# Altium footprint library FootPrintLib_1.PcbLib: 498 footprints (part 23 of 35)
Each footprint in its own frame and in the unit in brackets; x right, y up, seen from the top. Pads: shape width x height; smd on the part's side, far side on the other; paste and mask are expansions set on the pad; w line width, h text height; cw(c..) or ccw(c..) is an arc to the next point about the centre after c.
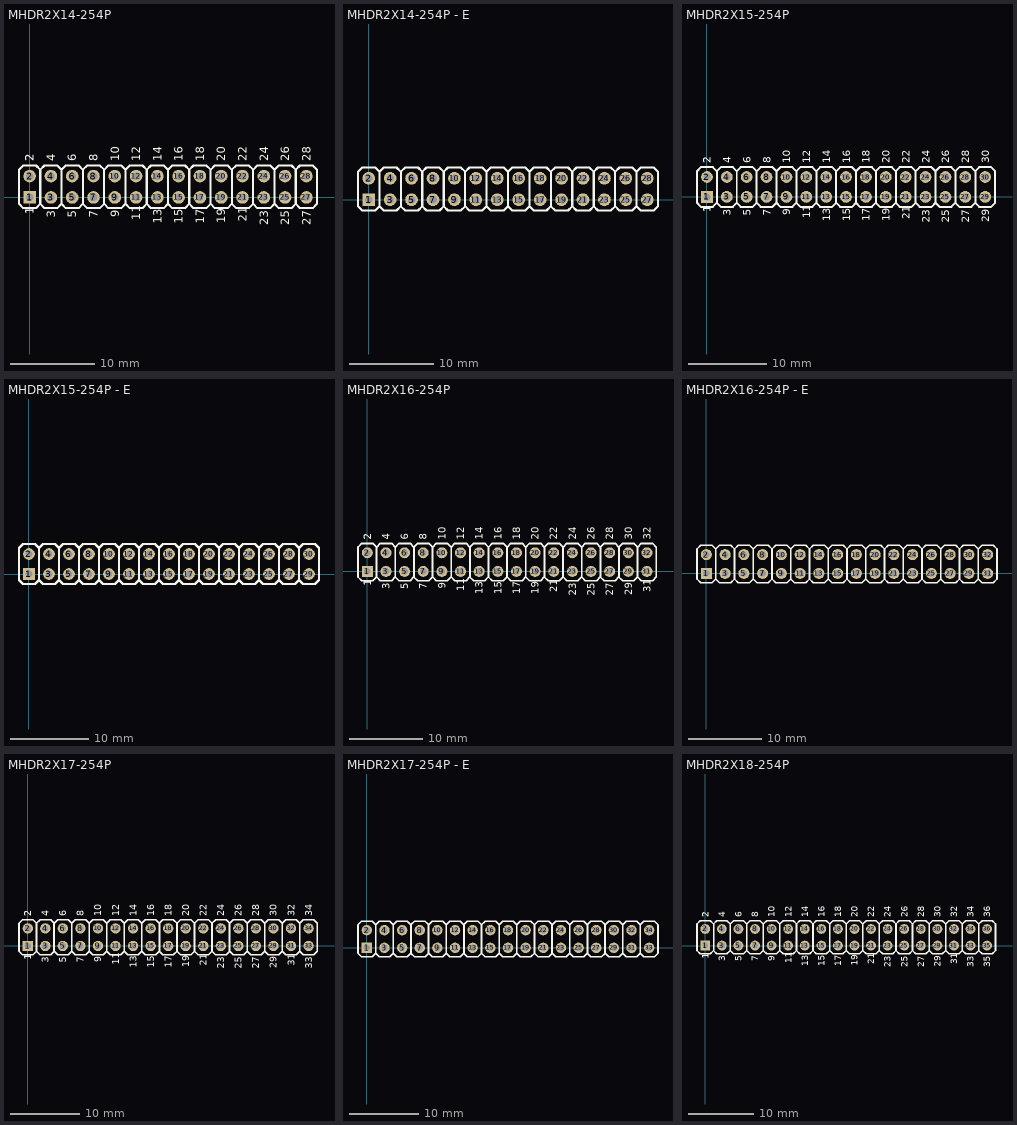
[diagram p22: the footprints below, top view; thin cyan lines are the x and y axes]

## MHDR2X14-254P [mm] "Male Header 2X14 with 2.54 mm Pitch"
pads (28):
  rect 1.5x1.5 hole 0.9: 1(0,0)
  round 1.5 hole 0.9: 2(0,2.54) 3(2.54,0) 4(2.54,2.54) 5(5.08,0) 6(5.08,2.54) 7(7.62,0) 8(7.62,2.54) 9(10.16,0) 10(10.16,2.54) 11(12.7,0) 12(12.7,2.54) 13(15.24,0) 14(15.24,2.54) 15(17.78,0) 16(17.78,2.54) 17(20.32,0) 18(20.32,2.54) 19(22.86,0) 20(22.86,2.54) 21(25.4,0) 22(25.4,2.54) 23(27.94,0) 24(27.94,2.54) 25(30.48,0) 26(30.48,2.54) 27(33.02,0) 28(33.02,2.54)
Top Overlay:
  lines w0.254: 1.27,-0.762 1.777,-1.268 3.302,-1.268 3.81,-0.76 3.81,3.304 4.318,3.812 5.841,3.812 6.35,3.302 ; 1.27,3.302 0.761,3.812 -0.762,3.812 -1.27,3.304 -1.27,-0.762 -0.763,-1.268 0.762,-1.268 1.27,-0.76 1.27,3.304 1.778,3.812 3.301,3.812 3.81,3.302 ; 3.81,-0.762 4.317,-1.268 5.842,-1.268 6.35,-0.76 6.35,3.304 6.858,3.812 8.381,3.812 8.89,3.302 ; 6.35,-0.762 6.857,-1.268 8.382,-1.268 8.89,-0.76 8.89,3.304 9.398,3.812 10.921,3.812 11.43,3.302 ; 8.89,-0.762 9.397,-1.268 10.922,-1.268 11.43,-0.76 11.43,3.304 11.938,3.812 13.461,3.812 13.97,3.302 ; 11.43,-0.762 11.937,-1.268 13.462,-1.268 13.97,-0.76 13.97,3.304 14.478,3.812 16.001,3.812 16.51,3.302 ; 13.97,-0.762 14.477,-1.268 16.002,-1.268 16.51,-0.76 16.51,3.304 17.018,3.812 18.541,3.812 19.05,3.302 ; 16.51,-0.762 17.017,-1.268 18.542,-1.268 19.05,-0.76 19.05,3.304 19.558,3.812 21.081,3.812 21.59,3.302 ; 19.05,-0.762 19.557,-1.268 21.082,-1.268 21.59,-0.76 21.59,3.304 22.098,3.812 23.621,3.812 24.13,3.302 ; 21.59,-0.762 22.097,-1.268 23.622,-1.268 24.13,-0.76 24.13,3.304 24.638,3.812 26.161,3.812 26.67,3.302 ; 24.13,-0.762 24.637,-1.268 26.162,-1.268 26.67,-0.76 26.67,3.304 27.178,3.812 28.701,3.812 29.21,3.302 ; 26.67,-0.762 27.177,-1.268 28.702,-1.268 29.21,-0.76 29.21,3.304 29.718,3.812 31.241,3.812 31.75,3.302 ; 29.21,-0.762 29.717,-1.268 31.242,-1.268 31.75,-0.76 31.75,3.304 32.258,3.812 33.781,3.812 34.29,3.302 ; 31.75,-0.762 32.257,-1.268 33.782,-1.268 34.29,-0.76 34.29,3.304
  text "1" at 0.508,-1.983 h1
  text "2" at 0.508,4.318 h1
  text "2" at 0.508,4.318 h1
  text "1" at 0.508,-1.983 h1
  text "4" at 3.048,4.318 h1
  text "3" at 3.048,-2.412 h1
  text "6" at 5.588,4.318 h1
  text "5" at 5.588,-2.412 h1
  text "8" at 8.128,4.318 h1
  text "7" at 8.128,-2.412 h1
  text "10" at 10.668,4.318 h1
  text "9" at 10.668,-2.364 h1
  text "12" at 13.208,4.318 h1
  text "11" at 13.208,-2.716 h1
  text "14" at 15.748,4.318 h1
  text "13" at 15.748,-3.145 h1
  text "16" at 18.288,4.318 h1
  text "15" at 18.288,-3.145 h1
  text "18" at 20.828,4.318 h1
  text "17" at 20.828,-3.145 h1
  text "20" at 23.368,4.318 h1
  text "19" at 23.368,-3.097 h1
  text "22" at 25.908,4.318 h1
  text "21" at 25.908,-2.874 h1
  text "24" at 28.448,4.318 h1
  text "23" at 28.448,-3.302 h1
  text "26" at 30.988,4.318 h1
  text "25" at 30.988,-3.302 h1
  text "28" at 33.528,4.318 h1
  text "27" at 33.528,-3.302 h1
3D body "PIN.STEP": height 8.43, standoff -2.49, extent 31.75,-1.27 34.29,1.27
3D body "PIN.STEP": height 8.43, standoff -2.49, extent 31.75,1.27 34.29,3.81
3D body "PIN.STEP": height 8.43, standoff -2.49, extent -1.27,1.27 1.27,3.81
3D body "PIN_mid.STEP": height 8.43, standoff -2.49, extent 29.21,-1.27 31.75,1.27
3D body "PIN_mid.STEP": height 8.43, standoff -2.49, extent 26.67,-1.27 29.21,1.27
3D body "PIN_mid.STEP": height 8.43, standoff -2.49, extent 24.13,-1.27 26.67,1.27
3D body "PIN_mid.STEP": height 8.43, standoff -2.49, extent 21.59,-1.27 24.13,1.27
3D body "PIN_mid.STEP": height 8.43, standoff -2.49, extent 19.05,-1.27 21.59,1.27
3D body "PIN_mid.STEP": height 8.43, standoff -2.49, extent 16.51,-1.27 19.05,1.27
3D body "PIN_mid.STEP": height 8.43, standoff -2.49, extent 13.97,-1.27 16.51,1.27
3D body "PIN_mid.STEP": height 8.43, standoff -2.49, extent 11.43,-1.27 13.97,1.27
3D body "PIN_mid.STEP": height 8.43, standoff -2.49, extent 8.89,-1.27 11.43,1.27
3D body "PIN_mid.STEP": height 8.43, standoff -2.49, extent 6.35,-1.27 8.89,1.27
3D body "PIN_mid.STEP": height 8.43, standoff -2.49, extent 3.81,-1.27 6.35,1.27
3D body "PIN_mid.STEP": height 8.43, standoff -2.49, extent 1.27,-1.27 3.81,1.27
3D body "PIN_mid.STEP": height 8.43, standoff -2.49, extent 1.27,1.27 3.81,3.81
3D body "PIN_mid.STEP": height 8.43, standoff -2.49, extent 29.21,1.27 31.75,3.81
3D body "PIN_mid.STEP": height 8.43, standoff -2.49, extent 26.67,1.27 29.21,3.81
3D body "PIN_mid.STEP": height 8.43, standoff -2.49, extent 24.13,1.27 26.67,3.81
3D body "PIN_mid.STEP": height 8.43, standoff -2.49, extent 21.59,1.27 24.13,3.81
3D body "PIN_mid.STEP": height 8.43, standoff -2.49, extent 19.05,1.27 21.59,3.81
3D body "PIN_mid.STEP": height 8.43, standoff -2.49, extent 16.51,1.27 19.05,3.81
3D body "PIN_mid.STEP": height 8.43, standoff -2.49, extent 13.97,1.27 16.51,3.81
3D body "PIN_mid.STEP": height 8.43, standoff -2.49, extent 11.43,1.27 13.97,3.81
3D body "PIN_mid.STEP": height 8.43, standoff -2.49, extent 8.89,1.27 11.43,3.81
3D body "PIN_mid.STEP": height 8.43, standoff -2.49, extent 6.35,1.27 8.89,3.81
3D body "PIN_mid.STEP": height 8.43, standoff -2.49, extent 3.81,1.27 6.35,3.81
3D body "PIN.STEP": height 8.43, standoff -2.49, extent -1.27,-1.27 1.27,1.27

## MHDR2X14-254P - E [mm] "Male Header 2X14 with 2.54 mm Pitch"
pads (28):
  rect 1.5x1.5 hole 0.9: 1(0,0)
  round 1.5 hole 0.9: 2(0,2.54) 3(2.54,0) 4(2.54,2.54) 5(5.08,0) 6(5.08,2.54) 7(7.62,0) 8(7.62,2.54) 9(10.16,0) 10(10.16,2.54) 11(12.7,0) 12(12.7,2.54) 13(15.24,0) 14(15.24,2.54) 15(17.78,0) 16(17.78,2.54) 17(20.32,0) 18(20.32,2.54) 19(22.86,0) 20(22.86,2.54) 21(25.4,0) 22(25.4,2.54) 23(27.94,0) 24(27.94,2.54) 25(30.48,0) 26(30.48,2.54) 27(33.02,0) 28(33.02,2.54)
Top Overlay:
  lines w0.254: 1.27,-0.762 1.777,-1.268 3.302,-1.268 3.81,-0.76 3.81,3.304 4.318,3.812 5.841,3.812 6.35,3.302 ; 1.27,3.302 0.761,3.812 -0.762,3.812 -1.27,3.304 -1.27,-0.762 -0.763,-1.268 0.762,-1.268 1.27,-0.76 1.27,3.304 1.778,3.812 3.301,3.812 3.81,3.302 ; 3.81,-0.762 4.317,-1.268 5.842,-1.268 6.35,-0.76 6.35,3.304 6.858,3.812 8.381,3.812 8.89,3.302 ; 6.35,-0.762 6.857,-1.268 8.382,-1.268 8.89,-0.76 8.89,3.304 9.398,3.812 10.921,3.812 11.43,3.302 ; 8.89,-0.762 9.397,-1.268 10.922,-1.268 11.43,-0.76 11.43,3.304 11.938,3.812 13.461,3.812 13.97,3.302 ; 11.43,-0.762 11.937,-1.268 13.462,-1.268 13.97,-0.76 13.97,3.304 14.478,3.812 16.001,3.812 16.51,3.302 ; 13.97,-0.762 14.477,-1.268 16.002,-1.268 16.51,-0.76 16.51,3.304 17.018,3.812 18.541,3.812 19.05,3.302 ; 16.51,-0.762 17.017,-1.268 18.542,-1.268 19.05,-0.76 19.05,3.304 19.558,3.812 21.081,3.812 21.59,3.302 ; 19.05,-0.762 19.557,-1.268 21.082,-1.268 21.59,-0.76 21.59,3.304 22.098,3.812 23.621,3.812 24.13,3.302 ; 21.59,-0.762 22.097,-1.268 23.622,-1.268 24.13,-0.76 24.13,3.304 24.638,3.812 26.161,3.812 26.67,3.302 ; 24.13,-0.762 24.637,-1.268 26.162,-1.268 26.67,-0.76 26.67,3.304 27.178,3.812 28.701,3.812 29.21,3.302 ; 26.67,-0.762 27.177,-1.268 28.702,-1.268 29.21,-0.76 29.21,3.304 29.718,3.812 31.241,3.812 31.75,3.302 ; 29.21,-0.762 29.717,-1.268 31.242,-1.268 31.75,-0.76 31.75,3.304 32.258,3.812 33.781,3.812 34.29,3.302 ; 31.75,-0.762 32.257,-1.268 33.782,-1.268 34.29,-0.76 34.29,3.304
3D body "PIN.STEP": height 8.43, standoff -2.49, extent -1.27,-1.27 1.27,1.27
3D body "PIN_mid.STEP": height 8.43, standoff -2.49, extent 3.81,1.27 6.35,3.81
3D body "PIN_mid.STEP": height 8.43, standoff -2.49, extent 6.35,1.27 8.89,3.81
3D body "PIN_mid.STEP": height 8.43, standoff -2.49, extent 8.89,1.27 11.43,3.81
3D body "PIN_mid.STEP": height 8.43, standoff -2.49, extent 11.43,1.27 13.97,3.81
3D body "PIN_mid.STEP": height 8.43, standoff -2.49, extent 13.97,1.27 16.51,3.81
3D body "PIN_mid.STEP": height 8.43, standoff -2.49, extent 16.51,1.27 19.05,3.81
3D body "PIN_mid.STEP": height 8.43, standoff -2.49, extent 19.05,1.27 21.59,3.81
3D body "PIN_mid.STEP": height 8.43, standoff -2.49, extent 21.59,1.27 24.13,3.81
3D body "PIN_mid.STEP": height 8.43, standoff -2.49, extent 24.13,1.27 26.67,3.81
3D body "PIN_mid.STEP": height 8.43, standoff -2.49, extent 26.67,1.27 29.21,3.81
3D body "PIN_mid.STEP": height 8.43, standoff -2.49, extent 29.21,1.27 31.75,3.81
3D body "PIN_mid.STEP": height 8.43, standoff -2.49, extent 1.27,1.27 3.81,3.81
3D body "PIN_mid.STEP": height 8.43, standoff -2.49, extent 1.27,-1.27 3.81,1.27
3D body "PIN_mid.STEP": height 8.43, standoff -2.49, extent 3.81,-1.27 6.35,1.27
3D body "PIN_mid.STEP": height 8.43, standoff -2.49, extent 6.35,-1.27 8.89,1.27
3D body "PIN_mid.STEP": height 8.43, standoff -2.49, extent 8.89,-1.27 11.43,1.27
3D body "PIN_mid.STEP": height 8.43, standoff -2.49, extent 11.43,-1.27 13.97,1.27
3D body "PIN_mid.STEP": height 8.43, standoff -2.49, extent 13.97,-1.27 16.51,1.27
3D body "PIN_mid.STEP": height 8.43, standoff -2.49, extent 16.51,-1.27 19.05,1.27
3D body "PIN_mid.STEP": height 8.43, standoff -2.49, extent 19.05,-1.27 21.59,1.27
3D body "PIN_mid.STEP": height 8.43, standoff -2.49, extent 21.59,-1.27 24.13,1.27
3D body "PIN_mid.STEP": height 8.43, standoff -2.49, extent 24.13,-1.27 26.67,1.27
3D body "PIN_mid.STEP": height 8.43, standoff -2.49, extent 26.67,-1.27 29.21,1.27
3D body "PIN_mid.STEP": height 8.43, standoff -2.49, extent 29.21,-1.27 31.75,1.27
3D body "PIN.STEP": height 8.43, standoff -2.49, extent -1.27,1.27 1.27,3.81
3D body "PIN.STEP": height 8.43, standoff -2.49, extent 31.75,1.27 34.29,3.81
3D body "PIN.STEP": height 8.43, standoff -2.49, extent 31.75,-1.27 34.29,1.27

## MHDR2X15-254P [mm] "Male Header 2X15 with 2.54 mm Pitch"
pads (30):
  rect 1.5x1.5 hole 0.9: 1(0,0)
  round 1.5 hole 0.9: 2(0,2.54) 3(2.54,0) 4(2.54,2.54) 5(5.08,0) 6(5.08,2.54) 7(7.62,0) 8(7.62,2.54) 9(10.16,0) 10(10.16,2.54) 11(12.7,0) 12(12.7,2.54) 13(15.24,0) 14(15.24,2.54) 15(17.78,0) 16(17.78,2.54) 17(20.32,0) 18(20.32,2.54) 19(22.86,0) 20(22.86,2.54) 21(25.4,0) 22(25.4,2.54) 23(27.94,0) 24(27.94,2.54) 25(30.48,0) 26(30.48,2.54) 27(33.02,0) 28(33.02,2.54) 29(35.56,0) 30(35.56,2.54)
Top Overlay:
  lines w0.254: 1.27,-0.762 1.777,-1.268 3.302,-1.268 3.81,-0.76 3.81,3.304 4.318,3.812 5.841,3.812 6.35,3.302 ; 1.27,3.302 0.761,3.812 -0.762,3.812 -1.27,3.304 -1.27,-0.762 -0.763,-1.268 0.762,-1.268 1.27,-0.76 1.27,3.304 1.778,3.812 3.301,3.812 3.81,3.302 ; 3.81,-0.762 4.317,-1.268 5.842,-1.268 6.35,-0.76 6.35,3.304 6.858,3.812 8.381,3.812 8.89,3.302 ; 6.35,-0.762 6.857,-1.268 8.382,-1.268 8.89,-0.76 8.89,3.304 9.398,3.812 10.921,3.812 11.43,3.302 ; 8.89,-0.762 9.397,-1.268 10.922,-1.268 11.43,-0.76 11.43,3.304 11.938,3.812 13.461,3.812 13.97,3.302 ; 11.43,-0.762 11.937,-1.268 13.462,-1.268 13.97,-0.76 13.97,3.304 14.478,3.812 16.001,3.812 16.51,3.302 ; 13.97,-0.762 14.477,-1.268 16.002,-1.268 16.51,-0.76 16.51,3.304 17.018,3.812 18.541,3.812 19.05,3.302 ; 16.51,-0.762 17.017,-1.268 18.542,-1.268 19.05,-0.76 19.05,3.304 19.558,3.812 21.081,3.812 21.59,3.302 ; 19.05,-0.762 19.557,-1.268 21.082,-1.268 21.59,-0.76 21.59,3.304 22.098,3.812 23.621,3.812 24.13,3.302 ; 21.59,-0.762 22.097,-1.268 23.622,-1.268 24.13,-0.76 24.13,3.304 24.638,3.812 26.161,3.812 26.67,3.302 ; 24.13,-0.762 24.637,-1.268 26.162,-1.268 26.67,-0.76 26.67,3.304 27.178,3.812 28.701,3.812 29.21,3.302 ; 26.67,-0.762 27.177,-1.268 28.702,-1.268 29.21,-0.76 29.21,3.304 29.718,3.812 31.241,3.812 31.75,3.302 ; 29.21,-0.762 29.717,-1.268 31.242,-1.268 31.75,-0.76 31.75,3.304 32.258,3.812 33.781,3.812 34.29,3.302 ; 31.75,-0.762 32.257,-1.268 33.782,-1.268 34.29,-0.76 34.29,3.304 34.798,3.812 36.321,3.812 36.83,3.302 ; 34.29,-0.762 34.797,-1.268 36.322,-1.268 36.83,-0.76 36.83,3.304
  text "29" at 36.068,-3.254 h1
  text "30" at 36.068,4.318 h1
  text "27" at 33.528,-3.302 h1
  text "28" at 33.528,4.318 h1
  text "25" at 30.988,-3.302 h1
  text "26" at 30.988,4.318 h1
  text "23" at 28.448,-3.302 h1
  text "24" at 28.448,4.318 h1
  text "21" at 25.908,-2.874 h1
  text "22" at 25.908,4.318 h1
  text "19" at 23.368,-3.097 h1
  text "20" at 23.368,4.318 h1
  text "17" at 20.828,-3.145 h1
  text "18" at 20.828,4.318 h1
  text "15" at 18.288,-3.145 h1
  text "16" at 18.288,4.318 h1
  text "13" at 15.748,-3.145 h1
  text "14" at 15.748,4.318 h1
  text "11" at 13.208,-2.716 h1
  text "12" at 13.208,4.318 h1
  text "9" at 10.668,-2.364 h1
  text "10" at 10.668,4.318 h1
  text "7" at 8.128,-2.412 h1
  text "8" at 8.128,4.318 h1
  text "5" at 5.588,-2.412 h1
  text "6" at 5.588,4.318 h1
  text "3" at 3.048,-2.412 h1
  text "4" at 3.048,4.318 h1
  text "1" at 0.508,-1.983 h1
  text "2" at 0.508,4.318 h1
  text "2" at 0.508,4.318 h1
  text "1" at 0.508,-1.983 h1
3D body "PIN.STEP": height 8.43, standoff -2.49, extent -1.27,-1.27 1.27,1.27
3D body "PIN_mid.STEP": height 8.43, standoff -2.49, extent 3.81,1.27 6.35,3.81
3D body "PIN_mid.STEP": height 8.43, standoff -2.49, extent 6.35,1.27 8.89,3.81
3D body "PIN_mid.STEP": height 8.43, standoff -2.49, extent 8.89,1.27 11.43,3.81
3D body "PIN_mid.STEP": height 8.43, standoff -2.49, extent 11.43,1.27 13.97,3.81
3D body "PIN_mid.STEP": height 8.43, standoff -2.49, extent 13.97,1.27 16.51,3.81
3D body "PIN_mid.STEP": height 8.43, standoff -2.49, extent 16.51,1.27 19.05,3.81
3D body "PIN_mid.STEP": height 8.43, standoff -2.49, extent 19.05,1.27 21.59,3.81
3D body "PIN_mid.STEP": height 8.43, standoff -2.49, extent 21.59,1.27 24.13,3.81
3D body "PIN_mid.STEP": height 8.43, standoff -2.49, extent 24.13,1.27 26.67,3.81
3D body "PIN_mid.STEP": height 8.43, standoff -2.49, extent 26.67,1.27 29.21,3.81
3D body "PIN_mid.STEP": height 8.43, standoff -2.49, extent 29.21,1.27 31.75,3.81
3D body "PIN_mid.STEP": height 8.43, standoff -2.49, extent 31.75,1.27 34.29,3.81
3D body "PIN_mid.STEP": height 8.43, standoff -2.49, extent 1.27,1.27 3.81,3.81
3D body "PIN_mid.STEP": height 8.43, standoff -2.49, extent 1.27,-1.27 3.81,1.27
3D body "PIN_mid.STEP": height 8.43, standoff -2.49, extent 3.81,-1.27 6.35,1.27
3D body "PIN_mid.STEP": height 8.43, standoff -2.49, extent 6.35,-1.27 8.89,1.27
3D body "PIN_mid.STEP": height 8.43, standoff -2.49, extent 8.89,-1.27 11.43,1.27
3D body "PIN_mid.STEP": height 8.43, standoff -2.49, extent 11.43,-1.27 13.97,1.27
3D body "PIN_mid.STEP": height 8.43, standoff -2.49, extent 13.97,-1.27 16.51,1.27
3D body "PIN_mid.STEP": height 8.43, standoff -2.49, extent 16.51,-1.27 19.05,1.27
3D body "PIN_mid.STEP": height 8.43, standoff -2.49, extent 19.05,-1.27 21.59,1.27
3D body "PIN_mid.STEP": height 8.43, standoff -2.49, extent 21.59,-1.27 24.13,1.27
3D body "PIN_mid.STEP": height 8.43, standoff -2.49, extent 24.13,-1.27 26.67,1.27
3D body "PIN_mid.STEP": height 8.43, standoff -2.49, extent 26.67,-1.27 29.21,1.27
3D body "PIN_mid.STEP": height 8.43, standoff -2.49, extent 29.21,-1.27 31.75,1.27
3D body "PIN_mid.STEP": height 8.43, standoff -2.49, extent 31.75,-1.27 34.29,1.27
3D body "PIN.STEP": height 8.43, standoff -2.49, extent -1.27,1.27 1.27,3.81
3D body "PIN.STEP": height 8.43, standoff -2.49, extent 34.29,1.27 36.83,3.81
3D body "PIN.STEP": height 8.43, standoff -2.49, extent 34.29,-1.27 36.83,1.27

## MHDR2X15-254P - E [mm] "Male Header 2X15 with 2.54 mm Pitch"
pads (30):
  rect 1.5x1.5 hole 0.9: 1(0,0)
  round 1.5 hole 0.9: 2(0,2.54) 3(2.54,0) 4(2.54,2.54) 5(5.08,0) 6(5.08,2.54) 7(7.62,0) 8(7.62,2.54) 9(10.16,0) 10(10.16,2.54) 11(12.7,0) 12(12.7,2.54) 13(15.24,0) 14(15.24,2.54) 15(17.78,0) 16(17.78,2.54) 17(20.32,0) 18(20.32,2.54) 19(22.86,0) 20(22.86,2.54) 21(25.4,0) 22(25.4,2.54) 23(27.94,0) 24(27.94,2.54) 25(30.48,0) 26(30.48,2.54) 27(33.02,0) 28(33.02,2.54) 29(35.56,0) 30(35.56,2.54)
Top Overlay:
  lines w0.254: 1.27,-0.762 1.777,-1.268 3.302,-1.268 3.81,-0.76 3.81,3.304 4.318,3.812 5.841,3.812 6.35,3.302 ; 1.27,3.302 0.761,3.812 -0.762,3.812 -1.27,3.304 -1.27,-0.762 -0.763,-1.268 0.762,-1.268 1.27,-0.76 1.27,3.304 1.778,3.812 3.301,3.812 3.81,3.302 ; 3.81,-0.762 4.317,-1.268 5.842,-1.268 6.35,-0.76 6.35,3.304 6.858,3.812 8.381,3.812 8.89,3.302 ; 6.35,-0.762 6.857,-1.268 8.382,-1.268 8.89,-0.76 8.89,3.304 9.398,3.812 10.921,3.812 11.43,3.302 ; 8.89,-0.762 9.397,-1.268 10.922,-1.268 11.43,-0.76 11.43,3.304 11.938,3.812 13.461,3.812 13.97,3.302 ; 11.43,-0.762 11.937,-1.268 13.462,-1.268 13.97,-0.76 13.97,3.304 14.478,3.812 16.001,3.812 16.51,3.302 ; 13.97,-0.762 14.477,-1.268 16.002,-1.268 16.51,-0.76 16.51,3.304 17.018,3.812 18.541,3.812 19.05,3.302 ; 16.51,-0.762 17.017,-1.268 18.542,-1.268 19.05,-0.76 19.05,3.304 19.558,3.812 21.081,3.812 21.59,3.302 ; 19.05,-0.762 19.557,-1.268 21.082,-1.268 21.59,-0.76 21.59,3.304 22.098,3.812 23.621,3.812 24.13,3.302 ; 21.59,-0.762 22.097,-1.268 23.622,-1.268 24.13,-0.76 24.13,3.304 24.638,3.812 26.161,3.812 26.67,3.302 ; 24.13,-0.762 24.637,-1.268 26.162,-1.268 26.67,-0.76 26.67,3.304 27.178,3.812 28.701,3.812 29.21,3.302 ; 26.67,-0.762 27.177,-1.268 28.702,-1.268 29.21,-0.76 29.21,3.304 29.718,3.812 31.241,3.812 31.75,3.302 ; 29.21,-0.762 29.717,-1.268 31.242,-1.268 31.75,-0.76 31.75,3.304 32.258,3.812 33.781,3.812 34.29,3.302 ; 31.75,-0.762 32.257,-1.268 33.782,-1.268 34.29,-0.76 34.29,3.304 34.798,3.812 36.321,3.812 36.83,3.302 ; 34.29,-0.762 34.797,-1.268 36.322,-1.268 36.83,-0.76 36.83,3.304
3D body "PIN.STEP": height 8.43, standoff -2.49, extent 34.29,-1.27 36.83,1.27
3D body "PIN.STEP": height 8.43, standoff -2.49, extent 34.29,1.27 36.83,3.81
3D body "PIN.STEP": height 8.43, standoff -2.49, extent -1.27,1.27 1.27,3.81
3D body "PIN_mid.STEP": height 8.43, standoff -2.49, extent 31.75,-1.27 34.29,1.27
3D body "PIN_mid.STEP": height 8.43, standoff -2.49, extent 29.21,-1.27 31.75,1.27
3D body "PIN_mid.STEP": height 8.43, standoff -2.49, extent 26.67,-1.27 29.21,1.27
3D body "PIN_mid.STEP": height 8.43, standoff -2.49, extent 24.13,-1.27 26.67,1.27
3D body "PIN_mid.STEP": height 8.43, standoff -2.49, extent 21.59,-1.27 24.13,1.27
3D body "PIN_mid.STEP": height 8.43, standoff -2.49, extent 19.05,-1.27 21.59,1.27
3D body "PIN_mid.STEP": height 8.43, standoff -2.49, extent 16.51,-1.27 19.05,1.27
3D body "PIN_mid.STEP": height 8.43, standoff -2.49, extent 13.97,-1.27 16.51,1.27
3D body "PIN_mid.STEP": height 8.43, standoff -2.49, extent 11.43,-1.27 13.97,1.27
3D body "PIN_mid.STEP": height 8.43, standoff -2.49, extent 8.89,-1.27 11.43,1.27
3D body "PIN_mid.STEP": height 8.43, standoff -2.49, extent 6.35,-1.27 8.89,1.27
3D body "PIN_mid.STEP": height 8.43, standoff -2.49, extent 3.81,-1.27 6.35,1.27
3D body "PIN_mid.STEP": height 8.43, standoff -2.49, extent 1.27,-1.27 3.81,1.27
3D body "PIN_mid.STEP": height 8.43, standoff -2.49, extent 1.27,1.27 3.81,3.81
3D body "PIN_mid.STEP": height 8.43, standoff -2.49, extent 31.75,1.27 34.29,3.81
3D body "PIN_mid.STEP": height 8.43, standoff -2.49, extent 29.21,1.27 31.75,3.81
3D body "PIN_mid.STEP": height 8.43, standoff -2.49, extent 26.67,1.27 29.21,3.81
3D body "PIN_mid.STEP": height 8.43, standoff -2.49, extent 24.13,1.27 26.67,3.81
3D body "PIN_mid.STEP": height 8.43, standoff -2.49, extent 21.59,1.27 24.13,3.81
3D body "PIN_mid.STEP": height 8.43, standoff -2.49, extent 19.05,1.27 21.59,3.81
3D body "PIN_mid.STEP": height 8.43, standoff -2.49, extent 16.51,1.27 19.05,3.81
3D body "PIN_mid.STEP": height 8.43, standoff -2.49, extent 13.97,1.27 16.51,3.81
3D body "PIN_mid.STEP": height 8.43, standoff -2.49, extent 11.43,1.27 13.97,3.81
3D body "PIN_mid.STEP": height 8.43, standoff -2.49, extent 8.89,1.27 11.43,3.81
3D body "PIN_mid.STEP": height 8.43, standoff -2.49, extent 6.35,1.27 8.89,3.81
3D body "PIN_mid.STEP": height 8.43, standoff -2.49, extent 3.81,1.27 6.35,3.81
3D body "PIN.STEP": height 8.43, standoff -2.49, extent -1.27,-1.27 1.27,1.27

## MHDR2X16-254P [mm] "Male Header 2X16 with 2.54 mm Pitch"
pads (32):
  rect 1.5x1.5 hole 0.9: 1(0,0)
  round 1.5 hole 0.9: 2(0,2.54) 3(2.54,0) 4(2.54,2.54) 5(5.08,0) 6(5.08,2.54) 7(7.62,0) 8(7.62,2.54) 9(10.16,0) 10(10.16,2.54) 11(12.7,0) 12(12.7,2.54) 13(15.24,0) 14(15.24,2.54) 15(17.78,0) 16(17.78,2.54) 17(20.32,0) 18(20.32,2.54) 19(22.86,0) 20(22.86,2.54) 21(25.4,0) 22(25.4,2.54) 23(27.94,0) 24(27.94,2.54) 25(30.48,0) 26(30.48,2.54) 27(33.02,0) 28(33.02,2.54) 29(35.56,0) 30(35.56,2.54) 31(38.1,0) 32(38.1,2.54)
Top Overlay:
  lines w0.254: 1.27,-0.762 1.777,-1.268 3.302,-1.268 3.81,-0.76 3.81,3.304 4.318,3.812 5.841,3.812 6.35,3.302 ; 1.27,3.302 0.761,3.812 -0.762,3.812 -1.27,3.304 -1.27,-0.762 -0.763,-1.268 0.762,-1.268 1.27,-0.76 1.27,3.304 1.778,3.812 3.301,3.812 3.81,3.302 ; 3.81,-0.762 4.317,-1.268 5.842,-1.268 6.35,-0.76 6.35,3.304 6.858,3.812 8.381,3.812 8.89,3.302 ; 6.35,-0.762 6.857,-1.268 8.382,-1.268 8.89,-0.76 8.89,3.304 9.398,3.812 10.921,3.812 11.43,3.302 ; 8.89,-0.762 9.397,-1.268 10.922,-1.268 11.43,-0.76 11.43,3.304 11.938,3.812 13.461,3.812 13.97,3.302 ; 11.43,-0.762 11.937,-1.268 13.462,-1.268 13.97,-0.76 13.97,3.304 14.478,3.812 16.001,3.812 16.51,3.302 ; 13.97,-0.762 14.477,-1.268 16.002,-1.268 16.51,-0.76 16.51,3.304 17.018,3.812 18.541,3.812 19.05,3.302 ; 16.51,-0.762 17.017,-1.268 18.542,-1.268 19.05,-0.76 19.05,3.304 19.558,3.812 21.081,3.812 21.59,3.302 ; 19.05,-0.762 19.557,-1.268 21.082,-1.268 21.59,-0.76 21.59,3.304 22.098,3.812 23.621,3.812 24.13,3.302 ; 21.59,-0.762 22.097,-1.268 23.622,-1.268 24.13,-0.76 24.13,3.304 24.638,3.812 26.161,3.812 26.67,3.302 ; 24.13,-0.762 24.637,-1.268 26.162,-1.268 26.67,-0.76 26.67,3.304 27.178,3.812 28.701,3.812 29.21,3.302 ; 26.67,-0.762 27.177,-1.268 28.702,-1.268 29.21,-0.76 29.21,3.304 29.718,3.812 31.241,3.812 31.75,3.302 ; 29.21,-0.762 29.717,-1.268 31.242,-1.268 31.75,-0.76 31.75,3.304 32.258,3.812 33.781,3.812 34.29,3.302 ; 31.75,-0.762 32.257,-1.268 33.782,-1.268 34.29,-0.76 34.29,3.304 34.798,3.812 36.321,3.812 36.83,3.302 ; 34.29,-0.762 34.797,-1.268 36.322,-1.268 36.83,-0.76 36.83,3.304 37.338,3.812 38.861,3.812 39.37,3.302 ; 36.83,-0.762 37.337,-1.268 38.862,-1.268 39.37,-0.76 39.37,3.304
  text "31" at 38.608,-2.874 h1
  text "32" at 38.608,4.318 h1
  text "29" at 36.068,-3.254 h1
  text "30" at 36.068,4.318 h1
  text "27" at 33.528,-3.302 h1
  text "28" at 33.528,4.318 h1
  text "25" at 30.988,-3.302 h1
  text "26" at 30.988,4.318 h1
  text "23" at 28.448,-3.302 h1
  text "24" at 28.448,4.318 h1
  text "21" at 25.908,-2.874 h1
  text "22" at 25.908,4.318 h1
  text "19" at 23.368,-3.097 h1
  text "20" at 23.368,4.318 h1
  text "17" at 20.828,-3.145 h1
  text "18" at 20.828,4.318 h1
  text "15" at 18.288,-3.145 h1
  text "16" at 18.288,4.318 h1
  text "13" at 15.748,-3.145 h1
  text "14" at 15.748,4.318 h1
  text "11" at 13.208,-2.716 h1
  text "12" at 13.208,4.318 h1
  text "9" at 10.668,-2.364 h1
  text "10" at 10.668,4.318 h1
  text "7" at 8.128,-2.412 h1
  text "8" at 8.128,4.318 h1
  text "5" at 5.588,-2.412 h1
  text "6" at 5.588,4.318 h1
  text "3" at 3.048,-2.412 h1
  text "4" at 3.048,4.318 h1
  text "1" at 0.508,-1.983 h1
  text "2" at 0.508,4.318 h1
  text "2" at 0.508,4.318 h1
  text "1" at 0.508,-1.983 h1
3D body "PIN.STEP": height 8.43, standoff -2.49, extent 36.83,-1.27 39.37,1.27
3D body "PIN.STEP": height 8.43, standoff -2.49, extent 36.83,1.27 39.37,3.81
3D body "PIN.STEP": height 8.43, standoff -2.49, extent -1.27,1.27 1.27,3.81
3D body "PIN_mid.STEP": height 8.43, standoff -2.49, extent 34.29,-1.27 36.83,1.27
3D body "PIN_mid.STEP": height 8.43, standoff -2.49, extent 31.75,-1.27 34.29,1.27
3D body "PIN_mid.STEP": height 8.43, standoff -2.49, extent 29.21,-1.27 31.75,1.27
3D body "PIN_mid.STEP": height 8.43, standoff -2.49, extent 26.67,-1.27 29.21,1.27
3D body "PIN_mid.STEP": height 8.43, standoff -2.49, extent 24.13,-1.27 26.67,1.27
3D body "PIN_mid.STEP": height 8.43, standoff -2.49, extent 21.59,-1.27 24.13,1.27
3D body "PIN_mid.STEP": height 8.43, standoff -2.49, extent 19.05,-1.27 21.59,1.27
3D body "PIN_mid.STEP": height 8.43, standoff -2.49, extent 16.51,-1.27 19.05,1.27
3D body "PIN_mid.STEP": height 8.43, standoff -2.49, extent 13.97,-1.27 16.51,1.27
3D body "PIN_mid.STEP": height 8.43, standoff -2.49, extent 11.43,-1.27 13.97,1.27
3D body "PIN_mid.STEP": height 8.43, standoff -2.49, extent 8.89,-1.27 11.43,1.27
3D body "PIN_mid.STEP": height 8.43, standoff -2.49, extent 6.35,-1.27 8.89,1.27
3D body "PIN_mid.STEP": height 8.43, standoff -2.49, extent 3.81,-1.27 6.35,1.27
3D body "PIN_mid.STEP": height 8.43, standoff -2.49, extent 1.27,-1.27 3.81,1.27
3D body "PIN_mid.STEP": height 8.43, standoff -2.49, extent 1.27,1.27 3.81,3.81
3D body "PIN_mid.STEP": height 8.43, standoff -2.49, extent 34.29,1.27 36.83,3.81
3D body "PIN_mid.STEP": height 8.43, standoff -2.49, extent 31.75,1.27 34.29,3.81
3D body "PIN_mid.STEP": height 8.43, standoff -2.49, extent 29.21,1.27 31.75,3.81
3D body "PIN_mid.STEP": height 8.43, standoff -2.49, extent 26.67,1.27 29.21,3.81
3D body "PIN_mid.STEP": height 8.43, standoff -2.49, extent 24.13,1.27 26.67,3.81
3D body "PIN_mid.STEP": height 8.43, standoff -2.49, extent 21.59,1.27 24.13,3.81
3D body "PIN_mid.STEP": height 8.43, standoff -2.49, extent 19.05,1.27 21.59,3.81
3D body "PIN_mid.STEP": height 8.43, standoff -2.49, extent 16.51,1.27 19.05,3.81
3D body "PIN_mid.STEP": height 8.43, standoff -2.49, extent 13.97,1.27 16.51,3.81
3D body "PIN_mid.STEP": height 8.43, standoff -2.49, extent 11.43,1.27 13.97,3.81
3D body "PIN_mid.STEP": height 8.43, standoff -2.49, extent 8.89,1.27 11.43,3.81
3D body "PIN_mid.STEP": height 8.43, standoff -2.49, extent 6.35,1.27 8.89,3.81
3D body "PIN_mid.STEP": height 8.43, standoff -2.49, extent 3.81,1.27 6.35,3.81
3D body "PIN.STEP": height 8.43, standoff -2.49, extent -1.27,-1.27 1.27,1.27

## MHDR2X16-254P - E [mm] "Male Header 2X16 with 2.54 mm Pitch"
pads (32):
  rect 1.5x1.5 hole 0.9: 1(0,0)
  round 1.5 hole 0.9: 2(0,2.54) 3(2.54,0) 4(2.54,2.54) 5(5.08,0) 6(5.08,2.54) 7(7.62,0) 8(7.62,2.54) 9(10.16,0) 10(10.16,2.54) 11(12.7,0) 12(12.7,2.54) 13(15.24,0) 14(15.24,2.54) 15(17.78,0) 16(17.78,2.54) 17(20.32,0) 18(20.32,2.54) 19(22.86,0) 20(22.86,2.54) 21(25.4,0) 22(25.4,2.54) 23(27.94,0) 24(27.94,2.54) 25(30.48,0) 26(30.48,2.54) 27(33.02,0) 28(33.02,2.54) 29(35.56,0) 30(35.56,2.54) 31(38.1,0) 32(38.1,2.54)
Top Overlay:
  lines w0.254: 1.27,-0.762 1.777,-1.268 3.302,-1.268 3.81,-0.76 3.81,3.304 4.318,3.812 5.841,3.812 6.35,3.302 ; 1.27,3.302 0.761,3.812 -0.762,3.812 -1.27,3.304 -1.27,-0.762 -0.763,-1.268 0.762,-1.268 1.27,-0.76 1.27,3.304 1.778,3.812 3.301,3.812 3.81,3.302 ; 3.81,-0.762 4.317,-1.268 5.842,-1.268 6.35,-0.76 6.35,3.304 6.858,3.812 8.381,3.812 8.89,3.302 ; 6.35,-0.762 6.857,-1.268 8.382,-1.268 8.89,-0.76 8.89,3.304 9.398,3.812 10.921,3.812 11.43,3.302 ; 8.89,-0.762 9.397,-1.268 10.922,-1.268 11.43,-0.76 11.43,3.304 11.938,3.812 13.461,3.812 13.97,3.302 ; 11.43,-0.762 11.937,-1.268 13.462,-1.268 13.97,-0.76 13.97,3.304 14.478,3.812 16.001,3.812 16.51,3.302 ; 13.97,-0.762 14.477,-1.268 16.002,-1.268 16.51,-0.76 16.51,3.304 17.018,3.812 18.541,3.812 19.05,3.302 ; 16.51,-0.762 17.017,-1.268 18.542,-1.268 19.05,-0.76 19.05,3.304 19.558,3.812 21.081,3.812 21.59,3.302 ; 19.05,-0.762 19.557,-1.268 21.082,-1.268 21.59,-0.76 21.59,3.304 22.098,3.812 23.621,3.812 24.13,3.302 ; 21.59,-0.762 22.097,-1.268 23.622,-1.268 24.13,-0.76 24.13,3.304 24.638,3.812 26.161,3.812 26.67,3.302 ; 24.13,-0.762 24.637,-1.268 26.162,-1.268 26.67,-0.76 26.67,3.304 27.178,3.812 28.701,3.812 29.21,3.302 ; 26.67,-0.762 27.177,-1.268 28.702,-1.268 29.21,-0.76 29.21,3.304 29.718,3.812 31.241,3.812 31.75,3.302 ; 29.21,-0.762 29.717,-1.268 31.242,-1.268 31.75,-0.76 31.75,3.304 32.258,3.812 33.781,3.812 34.29,3.302 ; 31.75,-0.762 32.257,-1.268 33.782,-1.268 34.29,-0.76 34.29,3.304 34.798,3.812 36.321,3.812 36.83,3.302 ; 34.29,-0.762 34.797,-1.268 36.322,-1.268 36.83,-0.76 36.83,3.304 37.338,3.812 38.861,3.812 39.37,3.302 ; 36.83,-0.762 37.337,-1.268 38.862,-1.268 39.37,-0.76 39.37,3.304
3D body "PIN.STEP": height 8.43, standoff -2.49, extent -1.27,-1.27 1.27,1.27
3D body "PIN_mid.STEP": height 8.43, standoff -2.49, extent 3.81,1.27 6.35,3.81
3D body "PIN_mid.STEP": height 8.43, standoff -2.49, extent 6.35,1.27 8.89,3.81
3D body "PIN_mid.STEP": height 8.43, standoff -2.49, extent 8.89,1.27 11.43,3.81
3D body "PIN_mid.STEP": height 8.43, standoff -2.49, extent 11.43,1.27 13.97,3.81
3D body "PIN_mid.STEP": height 8.43, standoff -2.49, extent 13.97,1.27 16.51,3.81
3D body "PIN_mid.STEP": height 8.43, standoff -2.49, extent 16.51,1.27 19.05,3.81
3D body "PIN_mid.STEP": height 8.43, standoff -2.49, extent 19.05,1.27 21.59,3.81
3D body "PIN_mid.STEP": height 8.43, standoff -2.49, extent 21.59,1.27 24.13,3.81
3D body "PIN_mid.STEP": height 8.43, standoff -2.49, extent 24.13,1.27 26.67,3.81
3D body "PIN_mid.STEP": height 8.43, standoff -2.49, extent 26.67,1.27 29.21,3.81
3D body "PIN_mid.STEP": height 8.43, standoff -2.49, extent 29.21,1.27 31.75,3.81
3D body "PIN_mid.STEP": height 8.43, standoff -2.49, extent 31.75,1.27 34.29,3.81
3D body "PIN_mid.STEP": height 8.43, standoff -2.49, extent 34.29,1.27 36.83,3.81
3D body "PIN_mid.STEP": height 8.43, standoff -2.49, extent 1.27,1.27 3.81,3.81
3D body "PIN_mid.STEP": height 8.43, standoff -2.49, extent 1.27,-1.27 3.81,1.27
3D body "PIN_mid.STEP": height 8.43, standoff -2.49, extent 3.81,-1.27 6.35,1.27
3D body "PIN_mid.STEP": height 8.43, standoff -2.49, extent 6.35,-1.27 8.89,1.27
3D body "PIN_mid.STEP": height 8.43, standoff -2.49, extent 8.89,-1.27 11.43,1.27
3D body "PIN_mid.STEP": height 8.43, standoff -2.49, extent 11.43,-1.27 13.97,1.27
3D body "PIN_mid.STEP": height 8.43, standoff -2.49, extent 13.97,-1.27 16.51,1.27
3D body "PIN_mid.STEP": height 8.43, standoff -2.49, extent 16.51,-1.27 19.05,1.27
3D body "PIN_mid.STEP": height 8.43, standoff -2.49, extent 19.05,-1.27 21.59,1.27
3D body "PIN_mid.STEP": height 8.43, standoff -2.49, extent 21.59,-1.27 24.13,1.27
3D body "PIN_mid.STEP": height 8.43, standoff -2.49, extent 24.13,-1.27 26.67,1.27
3D body "PIN_mid.STEP": height 8.43, standoff -2.49, extent 26.67,-1.27 29.21,1.27
3D body "PIN_mid.STEP": height 8.43, standoff -2.49, extent 29.21,-1.27 31.75,1.27
3D body "PIN_mid.STEP": height 8.43, standoff -2.49, extent 31.75,-1.27 34.29,1.27
3D body "PIN_mid.STEP": height 8.43, standoff -2.49, extent 34.29,-1.27 36.83,1.27
3D body "PIN.STEP": height 8.43, standoff -2.49, extent -1.27,1.27 1.27,3.81
3D body "PIN.STEP": height 8.43, standoff -2.49, extent 36.83,1.27 39.37,3.81
3D body "PIN.STEP": height 8.43, standoff -2.49, extent 36.83,-1.27 39.37,1.27

## MHDR2X17-254P [mm] "Male Header 2X17 with 2.54 mm Pitch"
pads (34):
  rect 1.5x1.5 hole 0.9: 1(0,0)
  round 1.5 hole 0.9: 2(0,2.54) 3(2.54,0) 4(2.54,2.54) 5(5.08,0) 6(5.08,2.54) 7(7.62,0) 8(7.62,2.54) 9(10.16,0) 10(10.16,2.54) 11(12.7,0) 12(12.7,2.54) 13(15.24,0) 14(15.24,2.54) 15(17.78,0) 16(17.78,2.54) 17(20.32,0) 18(20.32,2.54) 19(22.86,0) 20(22.86,2.54) 21(25.4,0) 22(25.4,2.54) 23(27.94,0) 24(27.94,2.54) 25(30.48,0) 26(30.48,2.54) 27(33.02,0) 28(33.02,2.54) 29(35.56,0) 30(35.56,2.54) 31(38.1,0) 32(38.1,2.54) 33(40.64,0) 34(40.64,2.54)
Top Overlay:
  lines w0.254: 1.27,-0.762 1.777,-1.268 3.302,-1.268 3.81,-0.76 3.81,3.304 4.318,3.812 5.841,3.812 6.35,3.302 ; 1.27,3.302 0.761,3.812 -0.762,3.812 -1.27,3.304 -1.27,-0.762 -0.763,-1.268 0.762,-1.268 1.27,-0.76 1.27,3.304 1.778,3.812 3.301,3.812 3.81,3.302 ; 3.81,-0.762 4.317,-1.268 5.842,-1.268 6.35,-0.76 6.35,3.304 6.858,3.812 8.381,3.812 8.89,3.302 ; 6.35,-0.762 6.857,-1.268 8.382,-1.268 8.89,-0.76 8.89,3.304 9.398,3.812 10.921,3.812 11.43,3.302 ; 8.89,-0.762 9.397,-1.268 10.922,-1.268 11.43,-0.76 11.43,3.304 11.938,3.812 13.461,3.812 13.97,3.302 ; 11.43,-0.762 11.937,-1.268 13.462,-1.268 13.97,-0.76 13.97,3.304 14.478,3.812 16.001,3.812 16.51,3.302 ; 13.97,-0.762 14.477,-1.268 16.002,-1.268 16.51,-0.76 16.51,3.304 17.018,3.812 18.541,3.812 19.05,3.302 ; 16.51,-0.762 17.017,-1.268 18.542,-1.268 19.05,-0.76 19.05,3.304 19.558,3.812 21.081,3.812 21.59,3.302 ; 19.05,-0.762 19.557,-1.268 21.082,-1.268 21.59,-0.76 21.59,3.304 22.098,3.812 23.621,3.812 24.13,3.302 ; 21.59,-0.762 22.097,-1.268 23.622,-1.268 24.13,-0.76 24.13,3.304 24.638,3.812 26.161,3.812 26.67,3.302 ; 24.13,-0.762 24.637,-1.268 26.162,-1.268 26.67,-0.76 26.67,3.304 27.178,3.812 28.701,3.812 29.21,3.302 ; 26.67,-0.762 27.177,-1.268 28.702,-1.268 29.21,-0.76 29.21,3.304 29.718,3.812 31.241,3.812 31.75,3.302 ; 29.21,-0.762 29.717,-1.268 31.242,-1.268 31.75,-0.76 31.75,3.304 32.258,3.812 33.781,3.812 34.29,3.302 ; 31.75,-0.762 32.257,-1.268 33.782,-1.268 34.29,-0.76 34.29,3.304 34.798,3.812 36.321,3.812 36.83,3.302 ; 34.29,-0.762 34.797,-1.268 36.322,-1.268 36.83,-0.76 36.83,3.304 37.338,3.812 38.861,3.812 39.37,3.302 ; 36.83,-0.762 37.337,-1.268 38.862,-1.268 39.37,-0.76 39.37,3.304 39.878,3.812 41.401,3.812 41.91,3.302 ; 39.37,-0.762 39.877,-1.268 41.402,-1.268 41.91,-0.76 41.91,3.304
  text "33" at 41.148,-3.302 h1
  text "34" at 41.148,4.318 h1
  text "31" at 38.608,-2.874 h1
  text "32" at 38.608,4.318 h1
  text "29" at 36.068,-3.254 h1
  text "30" at 36.068,4.318 h1
  text "27" at 33.528,-3.302 h1
  text "28" at 33.528,4.318 h1
  text "25" at 30.988,-3.302 h1
  text "26" at 30.988,4.318 h1
  text "23" at 28.448,-3.302 h1
  text "24" at 28.448,4.318 h1
  text "21" at 25.908,-2.874 h1
  text "22" at 25.908,4.318 h1
  text "19" at 23.368,-3.097 h1
  text "20" at 23.368,4.318 h1
  text "17" at 20.828,-3.145 h1
  text "18" at 20.828,4.318 h1
  text "15" at 18.288,-3.145 h1
  text "16" at 18.288,4.318 h1
  text "13" at 15.748,-3.145 h1
  text "14" at 15.748,4.318 h1
  text "11" at 13.208,-2.716 h1
  text "12" at 13.208,4.318 h1
  text "9" at 10.668,-2.364 h1
  text "10" at 10.668,4.318 h1
  text "7" at 8.128,-2.412 h1
  text "8" at 8.128,4.318 h1
  text "5" at 5.588,-2.412 h1
  text "6" at 5.588,4.318 h1
  text "3" at 3.048,-2.412 h1
  text "4" at 3.048,4.318 h1
  text "1" at 0.508,-1.983 h1
  text "2" at 0.508,4.318 h1
  text "2" at 0.508,4.318 h1
  text "1" at 0.508,-1.983 h1
3D body "PIN.STEP": height 8.43, standoff -2.49, extent -1.27,-1.27 1.27,1.27
3D body "PIN_mid.STEP": height 8.43, standoff -2.49, extent 3.81,1.27 6.35,3.81
3D body "PIN_mid.STEP": height 8.43, standoff -2.49, extent 6.35,1.27 8.89,3.81
3D body "PIN_mid.STEP": height 8.43, standoff -2.49, extent 8.89,1.27 11.43,3.81
3D body "PIN_mid.STEP": height 8.43, standoff -2.49, extent 11.43,1.27 13.97,3.81
3D body "PIN_mid.STEP": height 8.43, standoff -2.49, extent 13.97,1.27 16.51,3.81
3D body "PIN_mid.STEP": height 8.43, standoff -2.49, extent 16.51,1.27 19.05,3.81
3D body "PIN_mid.STEP": height 8.43, standoff -2.49, extent 19.05,1.27 21.59,3.81
3D body "PIN_mid.STEP": height 8.43, standoff -2.49, extent 21.59,1.27 24.13,3.81
3D body "PIN_mid.STEP": height 8.43, standoff -2.49, extent 24.13,1.27 26.67,3.81
3D body "PIN_mid.STEP": height 8.43, standoff -2.49, extent 26.67,1.27 29.21,3.81
3D body "PIN_mid.STEP": height 8.43, standoff -2.49, extent 29.21,1.27 31.75,3.81
3D body "PIN_mid.STEP": height 8.43, standoff -2.49, extent 31.75,1.27 34.29,3.81
3D body "PIN_mid.STEP": height 8.43, standoff -2.49, extent 34.29,1.27 36.83,3.81
3D body "PIN_mid.STEP": height 8.43, standoff -2.49, extent 36.83,1.27 39.37,3.81
3D body "PIN_mid.STEP": height 8.43, standoff -2.49, extent 1.27,1.27 3.81,3.81
3D body "PIN_mid.STEP": height 8.43, standoff -2.49, extent 1.27,-1.27 3.81,1.27
3D body "PIN_mid.STEP": height 8.43, standoff -2.49, extent 3.81,-1.27 6.35,1.27
3D body "PIN_mid.STEP": height 8.43, standoff -2.49, extent 6.35,-1.27 8.89,1.27
3D body "PIN_mid.STEP": height 8.43, standoff -2.49, extent 8.89,-1.27 11.43,1.27
3D body "PIN_mid.STEP": height 8.43, standoff -2.49, extent 11.43,-1.27 13.97,1.27
3D body "PIN_mid.STEP": height 8.43, standoff -2.49, extent 13.97,-1.27 16.51,1.27
3D body "PIN_mid.STEP": height 8.43, standoff -2.49, extent 16.51,-1.27 19.05,1.27
3D body "PIN_mid.STEP": height 8.43, standoff -2.49, extent 19.05,-1.27 21.59,1.27
3D body "PIN_mid.STEP": height 8.43, standoff -2.49, extent 21.59,-1.27 24.13,1.27
3D body "PIN_mid.STEP": height 8.43, standoff -2.49, extent 24.13,-1.27 26.67,1.27
3D body "PIN_mid.STEP": height 8.43, standoff -2.49, extent 26.67,-1.27 29.21,1.27
3D body "PIN_mid.STEP": height 8.43, standoff -2.49, extent 29.21,-1.27 31.75,1.27
3D body "PIN_mid.STEP": height 8.43, standoff -2.49, extent 31.75,-1.27 34.29,1.27
3D body "PIN_mid.STEP": height 8.43, standoff -2.49, extent 34.29,-1.27 36.83,1.27
3D body "PIN_mid.STEP": height 8.43, standoff -2.49, extent 36.83,-1.27 39.37,1.27
3D body "PIN.STEP": height 8.43, standoff -2.49, extent -1.27,1.27 1.27,3.81
3D body "PIN.STEP": height 8.43, standoff -2.49, extent 39.37,1.27 41.91,3.81
3D body "PIN.STEP": height 8.43, standoff -2.49, extent 39.37,-1.27 41.91,1.27

## MHDR2X17-254P - E [mm] "Male Header 2X17 with 2.54 mm Pitch"
pads (34):
  rect 1.5x1.5 hole 0.9: 1(0,0)
  round 1.5 hole 0.9: 2(0,2.54) 3(2.54,0) 4(2.54,2.54) 5(5.08,0) 6(5.08,2.54) 7(7.62,0) 8(7.62,2.54) 9(10.16,0) 10(10.16,2.54) 11(12.7,0) 12(12.7,2.54) 13(15.24,0) 14(15.24,2.54) 15(17.78,0) 16(17.78,2.54) 17(20.32,0) 18(20.32,2.54) 19(22.86,0) 20(22.86,2.54) 21(25.4,0) 22(25.4,2.54) 23(27.94,0) 24(27.94,2.54) 25(30.48,0) 26(30.48,2.54) 27(33.02,0) 28(33.02,2.54) 29(35.56,0) 30(35.56,2.54) 31(38.1,0) 32(38.1,2.54) 33(40.64,0) 34(40.64,2.54)
Top Overlay:
  lines w0.254: 1.27,-0.762 1.777,-1.268 3.302,-1.268 3.81,-0.76 3.81,3.304 4.318,3.812 5.841,3.812 6.35,3.302 ; 1.27,3.302 0.761,3.812 -0.762,3.812 -1.27,3.304 -1.27,-0.762 -0.763,-1.268 0.762,-1.268 1.27,-0.76 1.27,3.304 1.778,3.812 3.301,3.812 3.81,3.302 ; 3.81,-0.762 4.317,-1.268 5.842,-1.268 6.35,-0.76 6.35,3.304 6.858,3.812 8.381,3.812 8.89,3.302 ; 6.35,-0.762 6.857,-1.268 8.382,-1.268 8.89,-0.76 8.89,3.304 9.398,3.812 10.921,3.812 11.43,3.302 ; 8.89,-0.762 9.397,-1.268 10.922,-1.268 11.43,-0.76 11.43,3.304 11.938,3.812 13.461,3.812 13.97,3.302 ; 11.43,-0.762 11.937,-1.268 13.462,-1.268 13.97,-0.76 13.97,3.304 14.478,3.812 16.001,3.812 16.51,3.302 ; 13.97,-0.762 14.477,-1.268 16.002,-1.268 16.51,-0.76 16.51,3.304 17.018,3.812 18.541,3.812 19.05,3.302 ; 16.51,-0.762 17.017,-1.268 18.542,-1.268 19.05,-0.76 19.05,3.304 19.558,3.812 21.081,3.812 21.59,3.302 ; 19.05,-0.762 19.557,-1.268 21.082,-1.268 21.59,-0.76 21.59,3.304 22.098,3.812 23.621,3.812 24.13,3.302 ; 21.59,-0.762 22.097,-1.268 23.622,-1.268 24.13,-0.76 24.13,3.304 24.638,3.812 26.161,3.812 26.67,3.302 ; 24.13,-0.762 24.637,-1.268 26.162,-1.268 26.67,-0.76 26.67,3.304 27.178,3.812 28.701,3.812 29.21,3.302 ; 26.67,-0.762 27.177,-1.268 28.702,-1.268 29.21,-0.76 29.21,3.304 29.718,3.812 31.241,3.812 31.75,3.302 ; 29.21,-0.762 29.717,-1.268 31.242,-1.268 31.75,-0.76 31.75,3.304 32.258,3.812 33.781,3.812 34.29,3.302 ; 31.75,-0.762 32.257,-1.268 33.782,-1.268 34.29,-0.76 34.29,3.304 34.798,3.812 36.321,3.812 36.83,3.302 ; 34.29,-0.762 34.797,-1.268 36.322,-1.268 36.83,-0.76 36.83,3.304 37.338,3.812 38.861,3.812 39.37,3.302 ; 36.83,-0.762 37.337,-1.268 38.862,-1.268 39.37,-0.76 39.37,3.304 39.878,3.812 41.401,3.812 41.91,3.302 ; 39.37,-0.762 39.877,-1.268 41.402,-1.268 41.91,-0.76 41.91,3.304
3D body "PIN.STEP": height 8.43, standoff -2.49, extent 39.37,-1.27 41.91,1.27
3D body "PIN.STEP": height 8.43, standoff -2.49, extent 39.37,1.27 41.91,3.81
3D body "PIN.STEP": height 8.43, standoff -2.49, extent -1.27,1.27 1.27,3.81
3D body "PIN_mid.STEP": height 8.43, standoff -2.49, extent 36.83,-1.27 39.37,1.27
3D body "PIN_mid.STEP": height 8.43, standoff -2.49, extent 34.29,-1.27 36.83,1.27
3D body "PIN_mid.STEP": height 8.43, standoff -2.49, extent 31.75,-1.27 34.29,1.27
3D body "PIN_mid.STEP": height 8.43, standoff -2.49, extent 29.21,-1.27 31.75,1.27
3D body "PIN_mid.STEP": height 8.43, standoff -2.49, extent 26.67,-1.27 29.21,1.27
3D body "PIN_mid.STEP": height 8.43, standoff -2.49, extent 24.13,-1.27 26.67,1.27
3D body "PIN_mid.STEP": height 8.43, standoff -2.49, extent 21.59,-1.27 24.13,1.27
3D body "PIN_mid.STEP": height 8.43, standoff -2.49, extent 19.05,-1.27 21.59,1.27
3D body "PIN_mid.STEP": height 8.43, standoff -2.49, extent 16.51,-1.27 19.05,1.27
3D body "PIN_mid.STEP": height 8.43, standoff -2.49, extent 13.97,-1.27 16.51,1.27
3D body "PIN_mid.STEP": height 8.43, standoff -2.49, extent 11.43,-1.27 13.97,1.27
3D body "PIN_mid.STEP": height 8.43, standoff -2.49, extent 8.89,-1.27 11.43,1.27
3D body "PIN_mid.STEP": height 8.43, standoff -2.49, extent 6.35,-1.27 8.89,1.27
3D body "PIN_mid.STEP": height 8.43, standoff -2.49, extent 3.81,-1.27 6.35,1.27
3D body "PIN_mid.STEP": height 8.43, standoff -2.49, extent 1.27,-1.27 3.81,1.27
3D body "PIN_mid.STEP": height 8.43, standoff -2.49, extent 1.27,1.27 3.81,3.81
3D body "PIN_mid.STEP": height 8.43, standoff -2.49, extent 36.83,1.27 39.37,3.81
3D body "PIN_mid.STEP": height 8.43, standoff -2.49, extent 34.29,1.27 36.83,3.81
3D body "PIN_mid.STEP": height 8.43, standoff -2.49, extent 31.75,1.27 34.29,3.81
3D body "PIN_mid.STEP": height 8.43, standoff -2.49, extent 29.21,1.27 31.75,3.81
3D body "PIN_mid.STEP": height 8.43, standoff -2.49, extent 26.67,1.27 29.21,3.81
3D body "PIN_mid.STEP": height 8.43, standoff -2.49, extent 24.13,1.27 26.67,3.81
3D body "PIN_mid.STEP": height 8.43, standoff -2.49, extent 21.59,1.27 24.13,3.81
3D body "PIN_mid.STEP": height 8.43, standoff -2.49, extent 19.05,1.27 21.59,3.81
3D body "PIN_mid.STEP": height 8.43, standoff -2.49, extent 16.51,1.27 19.05,3.81
3D body "PIN_mid.STEP": height 8.43, standoff -2.49, extent 13.97,1.27 16.51,3.81
3D body "PIN_mid.STEP": height 8.43, standoff -2.49, extent 11.43,1.27 13.97,3.81
3D body "PIN_mid.STEP": height 8.43, standoff -2.49, extent 8.89,1.27 11.43,3.81
3D body "PIN_mid.STEP": height 8.43, standoff -2.49, extent 6.35,1.27 8.89,3.81
3D body "PIN_mid.STEP": height 8.43, standoff -2.49, extent 3.81,1.27 6.35,3.81
3D body "PIN.STEP": height 8.43, standoff -2.49, extent -1.27,-1.27 1.27,1.27

## MHDR2X18-254P [mm] "Male Header 2X18 with 2.54 mm Pitch"
pads (36):
  rect 1.5x1.5 hole 0.9: 1(0,0)
  round 1.5 hole 0.9: 2(0,2.54) 3(2.54,0) 4(2.54,2.54) 5(5.08,0) 6(5.08,2.54) 7(7.62,0) 8(7.62,2.54) 9(10.16,0) 10(10.16,2.54) 11(12.7,0) 12(12.7,2.54) 13(15.24,0) 14(15.24,2.54) 15(17.78,0) 16(17.78,2.54) 17(20.32,0) 18(20.32,2.54) 19(22.86,0) 20(22.86,2.54) 21(25.4,0) 22(25.4,2.54) 23(27.94,0) 24(27.94,2.54) 25(30.48,0) 26(30.48,2.54) 27(33.02,0) 28(33.02,2.54) 29(35.56,0) 30(35.56,2.54) 31(38.1,0) 32(38.1,2.54) 33(40.64,0) 34(40.64,2.54) 35(43.18,0) 36(43.18,2.54)
Top Overlay:
  lines w0.254: 1.27,-0.762 1.777,-1.268 3.302,-1.268 3.81,-0.76 3.81,3.304 4.318,3.812 5.841,3.812 6.35,3.302 ; 1.27,3.302 0.761,3.812 -0.762,3.812 -1.27,3.304 -1.27,-0.762 -0.763,-1.268 0.762,-1.268 1.27,-0.76 1.27,3.304 1.778,3.812 3.301,3.812 3.81,3.302 ; 3.81,-0.762 4.317,-1.268 5.842,-1.268 6.35,-0.76 6.35,3.304 6.858,3.812 8.381,3.812 8.89,3.302 ; 6.35,-0.762 6.857,-1.268 8.382,-1.268 8.89,-0.76 8.89,3.304 9.398,3.812 10.921,3.812 11.43,3.302 ; 8.89,-0.762 9.397,-1.268 10.922,-1.268 11.43,-0.76 11.43,3.304 11.938,3.812 13.461,3.812 13.97,3.302 ; 11.43,-0.762 11.937,-1.268 13.462,-1.268 13.97,-0.76 13.97,3.304 14.478,3.812 16.001,3.812 16.51,3.302 ; 13.97,-0.762 14.477,-1.268 16.002,-1.268 16.51,-0.76 16.51,3.304 17.018,3.812 18.541,3.812 19.05,3.302 ; 16.51,-0.762 17.017,-1.268 18.542,-1.268 19.05,-0.76 19.05,3.304 19.558,3.812 21.081,3.812 21.59,3.302 ; 19.05,-0.762 19.557,-1.268 21.082,-1.268 21.59,-0.76 21.59,3.304 22.098,3.812 23.621,3.812 24.13,3.302 ; 21.59,-0.762 22.097,-1.268 23.622,-1.268 24.13,-0.76 24.13,3.304 24.638,3.812 26.161,3.812 26.67,3.302 ; 24.13,-0.762 24.637,-1.268 26.162,-1.268 26.67,-0.76 26.67,3.304 27.178,3.812 28.701,3.812 29.21,3.302 ; 26.67,-0.762 27.177,-1.268 28.702,-1.268 29.21,-0.76 29.21,3.304 29.718,3.812 31.241,3.812 31.75,3.302 ; 29.21,-0.762 29.717,-1.268 31.242,-1.268 31.75,-0.76 31.75,3.304 32.258,3.812 33.781,3.812 34.29,3.302 ; 31.75,-0.762 32.257,-1.268 33.782,-1.268 34.29,-0.76 34.29,3.304 34.798,3.812 36.321,3.812 36.83,3.302 ; 34.29,-0.762 34.797,-1.268 36.322,-1.268 36.83,-0.76 36.83,3.304 37.338,3.812 38.861,3.812 39.37,3.302 ; 36.83,-0.762 37.337,-1.268 38.862,-1.268 39.37,-0.76 39.37,3.304 39.878,3.812 41.401,3.812 41.91,3.302 ; 39.37,-0.762 39.877,-1.268 41.402,-1.268 41.91,-0.76 41.91,3.304 42.418,3.812 43.941,3.812 44.45,3.302 ; 41.91,-0.762 42.417,-1.268 43.942,-1.268 44.45,-0.76 44.45,3.304
  text "35" at 43.688,-3.302 h1
  text "36" at 43.688,4.318 h1
  text "33" at 41.148,-3.302 h1
  text "34" at 41.148,4.318 h1
  text "31" at 38.608,-2.874 h1
  text "32" at 38.608,4.318 h1
  text "29" at 36.068,-3.254 h1
  text "30" at 36.068,4.318 h1
  text "27" at 33.528,-3.302 h1
  text "28" at 33.528,4.318 h1
  text "25" at 30.988,-3.302 h1
  text "26" at 30.988,4.318 h1
  text "23" at 28.448,-3.302 h1
  text "24" at 28.448,4.318 h1
  text "21" at 25.908,-2.874 h1
  text "22" at 25.908,4.318 h1
  text "19" at 23.368,-3.097 h1
  text "20" at 23.368,4.318 h1
  text "17" at 20.828,-3.145 h1
  text "18" at 20.828,4.318 h1
  text "15" at 18.288,-3.145 h1
  text "16" at 18.288,4.318 h1
  text "13" at 15.748,-3.145 h1
  text "14" at 15.748,4.318 h1
  text "11" at 13.208,-2.716 h1
  text "12" at 13.208,4.318 h1
  text "9" at 10.668,-2.364 h1
  text "10" at 10.668,4.318 h1
  text "7" at 8.128,-2.412 h1
  text "8" at 8.128,4.318 h1
  text "5" at 5.588,-2.412 h1
  text "6" at 5.588,4.318 h1
  text "3" at 3.048,-2.412 h1
  text "4" at 3.048,4.318 h1
  text "1" at 0.508,-1.983 h1
  text "2" at 0.508,4.318 h1
  text "2" at 0.508,4.318 h1
  text "1" at 0.508,-1.983 h1
3D body "PIN.STEP": height 8.43, standoff -2.49, extent 41.91,-1.27 44.45,1.27
3D body "PIN.STEP": height 8.43, standoff -2.49, extent 41.91,1.27 44.45,3.81
3D body "PIN.STEP": height 8.43, standoff -2.49, extent -1.27,1.27 1.27,3.81
3D body "PIN_mid.STEP": height 8.43, standoff -2.49, extent 39.37,-1.27 41.91,1.27
3D body "PIN_mid.STEP": height 8.43, standoff -2.49, extent 36.83,-1.27 39.37,1.27
3D body "PIN_mid.STEP": height 8.43, standoff -2.49, extent 34.29,-1.27 36.83,1.27
3D body "PIN_mid.STEP": height 8.43, standoff -2.49, extent 31.75,-1.27 34.29,1.27
3D body "PIN_mid.STEP": height 8.43, standoff -2.49, extent 29.21,-1.27 31.75,1.27
3D body "PIN_mid.STEP": height 8.43, standoff -2.49, extent 26.67,-1.27 29.21,1.27
3D body "PIN_mid.STEP": height 8.43, standoff -2.49, extent 24.13,-1.27 26.67,1.27
3D body "PIN_mid.STEP": height 8.43, standoff -2.49, extent 21.59,-1.27 24.13,1.27
3D body "PIN_mid.STEP": height 8.43, standoff -2.49, extent 19.05,-1.27 21.59,1.27
3D body "PIN_mid.STEP": height 8.43, standoff -2.49, extent 16.51,-1.27 19.05,1.27
3D body "PIN_mid.STEP": height 8.43, standoff -2.49, extent 13.97,-1.27 16.51,1.27
3D body "PIN_mid.STEP": height 8.43, standoff -2.49, extent 11.43,-1.27 13.97,1.27
3D body "PIN_mid.STEP": height 8.43, standoff -2.49, extent 8.89,-1.27 11.43,1.27
3D body "PIN_mid.STEP": height 8.43, standoff -2.49, extent 6.35,-1.27 8.89,1.27
3D body "PIN_mid.STEP": height 8.43, standoff -2.49, extent 3.81,-1.27 6.35,1.27
3D body "PIN_mid.STEP": height 8.43, standoff -2.49, extent 1.27,-1.27 3.81,1.27
3D body "PIN_mid.STEP": height 8.43, standoff -2.49, extent 1.27,1.27 3.81,3.81
3D body "PIN_mid.STEP": height 8.43, standoff -2.49, extent 39.37,1.27 41.91,3.81
3D body "PIN_mid.STEP": height 8.43, standoff -2.49, extent 36.83,1.27 39.37,3.81
3D body "PIN_mid.STEP": height 8.43, standoff -2.49, extent 34.29,1.27 36.83,3.81
3D body "PIN_mid.STEP": height 8.43, standoff -2.49, extent 31.75,1.27 34.29,3.81
3D body "PIN_mid.STEP": height 8.43, standoff -2.49, extent 29.21,1.27 31.75,3.81
3D body "PIN_mid.STEP": height 8.43, standoff -2.49, extent 26.67,1.27 29.21,3.81
3D body "PIN_mid.STEP": height 8.43, standoff -2.49, extent 24.13,1.27 26.67,3.81
3D body "PIN_mid.STEP": height 8.43, standoff -2.49, extent 21.59,1.27 24.13,3.81
3D body "PIN_mid.STEP": height 8.43, standoff -2.49, extent 19.05,1.27 21.59,3.81
3D body "PIN_mid.STEP": height 8.43, standoff -2.49, extent 16.51,1.27 19.05,3.81
3D body "PIN_mid.STEP": height 8.43, standoff -2.49, extent 13.97,1.27 16.51,3.81
3D body "PIN_mid.STEP": height 8.43, standoff -2.49, extent 11.43,1.27 13.97,3.81
3D body "PIN_mid.STEP": height 8.43, standoff -2.49, extent 8.89,1.27 11.43,3.81
3D body "PIN_mid.STEP": height 8.43, standoff -2.49, extent 6.35,1.27 8.89,3.81
3D body "PIN_mid.STEP": height 8.43, standoff -2.49, extent 3.81,1.27 6.35,3.81
3D body "PIN.STEP": height 8.43, standoff -2.49, extent -1.27,-1.27 1.27,1.27